# Altium schematic symbol library res.SchLib: 11 symbols
Pins are listed as number, name and electrical type; pins without a type are passive.

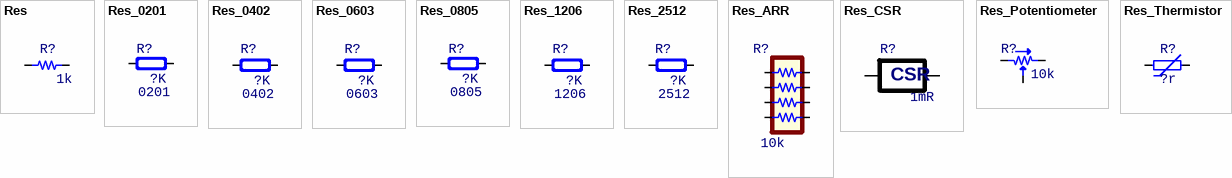
[diagram p0: symbols Res to Res_Thermistor]

## Res
designator R?, comment 1k
SMT Resistor; Value: 1k
footprint RES 0201/0603 (Chip Resistor, 2-Leads, Body 0.60x0.30mm, IPC Medium Density)
footprint RES 0402/1005 (Chip Resistor, 2-Leads, Body 1.0x0.5mm, IPC Medium Density)
footprint RES 0402/1005 RF (Chip Resistor, 2-Leads, Body 1.0x0.5mm, IPC High Density)
footprint RES 0603/1608 (Chip Resistor, 2-Leads, Body 1.60x0.80mm, IPC Medium Density)
footprint RES 0603/1608 RF (Chip Resistor, 2-Leads, Body 1.60x0.80mm, IPC High Density)
footprint RES 0805/2012 (Chip Resistor, 2-Leads, Body 2.00x1.25mm, IPC Medium Density)
footprint RES 0805/2012 RF (Chip Resistor, 2-Leads, Body 2.00x1.25mm, IPC High Density)
footprint RES 1206/3216 (Chip Resistor, 2-Leads, Body 3.13x1.55mm, IPC Medium Density)
footprint RES 1206/3216 RF (Chip Resistor, 2-Leads, Body 3.13x1.55mm, IPC High Density)
footprint RES_0201
footprint RES_0402
footprint RES_0603
footprint RES_0805
footprint RES_1206
footprint RES_1210
footprint RES_1812
footprint RES_2220
footprint RES_2512
pins: 1, 2

## Res_0201
designator R?, comment value ?K  Type: 0201  (hidden comment: R0201)
SMT Resistor; Specification: ±5%; Manufacturer: *
footprint RES 0201/0603 (Chip Resistor, 2-Leads, Body 0.60x0.30mm, IPC Medium Density)
footprint RES_0201
pins: 1, 2

## Res_0402
designator R?, comment value ?K  Type: 0402  (hidden comment: R0402)
SMT Resistor; Specification: ±5%; Manufacturer: *
footprint RES 0402/1005 RF (Chip Resistor, 2-Leads, Body 1.0x0.5mm, IPC High Density)
footprint RES_0402
pins: 1, 2

## Res_0603
designator R?, comment value ?K  Type: 0603  (hidden comment: R0603)
SMT Resistor; Specification: ±5%; Manufacturer: *
footprint RES 0603/1608 (Chip Resistor, 2-Leads, Body 1.60x0.80mm, IPC Medium Density)
footprint RES 0603/1608 RF (Chip Resistor, 2-Leads, Body 1.60x0.80mm, IPC High Density)
footprint RES_0603
pins: 1, 2

## Res_0805
designator R?, comment value ?K  Type: 0805  (hidden comment: R0805)
SMT Resistor; Specification: ±5%; Manufacturer: *
footprint RES 0805/2012 (Chip Resistor, 2-Leads, Body 2.00x1.25mm, IPC Medium Density)
footprint RES 0805/2012 RF (Chip Resistor, 2-Leads, Body 2.00x1.25mm, IPC High Density)
footprint RES_0805
pins: 1, 2

## Res_1206
designator R?, comment value ?K  Type: 1206  (hidden comment: R2512)
SMT Resistor; Specification: ±5%; Manufacturer: *
footprint RES 1206/3216 (Chip Resistor, 2-Leads, Body 3.13x1.55mm, IPC Medium Density)
footprint RES 1206/3216 RF (Chip Resistor, 2-Leads, Body 3.13x1.55mm, IPC High Density)
pins: 1, 2

## Res_2512
designator R?, comment value ?K  Type: 2512  (hidden comment: R2512)
SMT Resistor; Specification: ±5%; Manufacturer: *
pins: 1, 2

## Res_ARR
designator R?, comment 10k
SMT Resistor Array; Value: 10k
footprint RES_Array_1206
pins: 1, 2, 3, 4, 5, 6, 7, 8

## Res_CSR
designator R?  value 1mR
Current Sample Resistor
footprint STACKPOLE CSR0402 (Chip Resistor, 2-Leads, Body 1.0x0.5mm, IPC Medium Density)
footprint STACKPOLE CSR0603 (Chip Resistor, 2-Leads, Body 1.60x0.80mm, IPC Medium Density)
footprint STACKPOLE CSR0805 (Chip Resistor, 2-Leads, Body 2.00x1.25mm, IPC Medium Density)
footprint STACKPOLE CSR1206 (Chip Resistor, 2-Leads, Body 3.13x1.55mm, IPC Medium Density)
footprint STACKPOLE CSR1210 (Chip Resistor, 2-Leads, Body 3.1x2.6mm, IPC Medium Density)
footprint STACKPOLE CSR2010 (Chip Resistor, 2-Leads, Body 5.00x2.54mm, IPC Medium Density)
footprint STACKPOLE CSR2512 (Chip Resistor, 2-Leads, Body 6.40x3.20mm, IPC Medium Density)
footprint STACKPOLE CSRN2010 (Chip Resistor, 2-Leads, Body 5.00x2.54mm, IPC Medium Density)
footprint STACKPOLE CSRN2512 (Chip Resistor, 2-Leads, Body 6.40x3.20mm, IPC Medium Density)
pins: 1, 2
text: CSR

## Res_Potentiometer
designator R?, comment 10k
SMT Potentiometer; Value: 10k
footprint POT BOURNS TRIMPOT 3302 (Bourns Trimpot 3302 - Open Frame 2.75mm x 2.20mm x 1.05mm)
footprint POT MODEL91A
footprint POT Murata PVA2 (Murata PVA2 2.75mm x 2.20mm x 0.80mm)
footprint POT Panasonic EVM (Panasonic EVM3Y 3.45mm x 3.10mm x 1.55mm)
footprint POT PANASONIC EVM2W (Panasonic EVM2W 2.75mm x 2.20mm x 1.05mm)
pins: 1, 2, 3

## Res_Thermistor
designator R?, comment ?r
SMT Resistor; Value: ?r
footprint NTC 0402/1005 (Chip Thermistor, 2-Leads, Body 1.00x0.50mm, IPC Medium Density)
footprint NTC 0603/1608 (NTC Thermistor, 2-Leads, Body 1.60x0.80mm, IPC Medium Density)
footprint NTC 0805/2012 (Chip Thermistor, 2-Leads, Body 2.00x1.25mm, IPC Medium Density)
pins: 1, 2